# Altium footprint library PcbLib1.PcbLib: 24 footprints (part 2 of 2)
Each footprint in its own frame and in the unit in brackets; x right, y up, seen from the top. Pads: shape width x height; smd on the part's side, far side on the other; paste and mask are expansions set on the pad; w line width, h text height; cw(c..) or ccw(c..) is an arc to the next point about the centre after c.
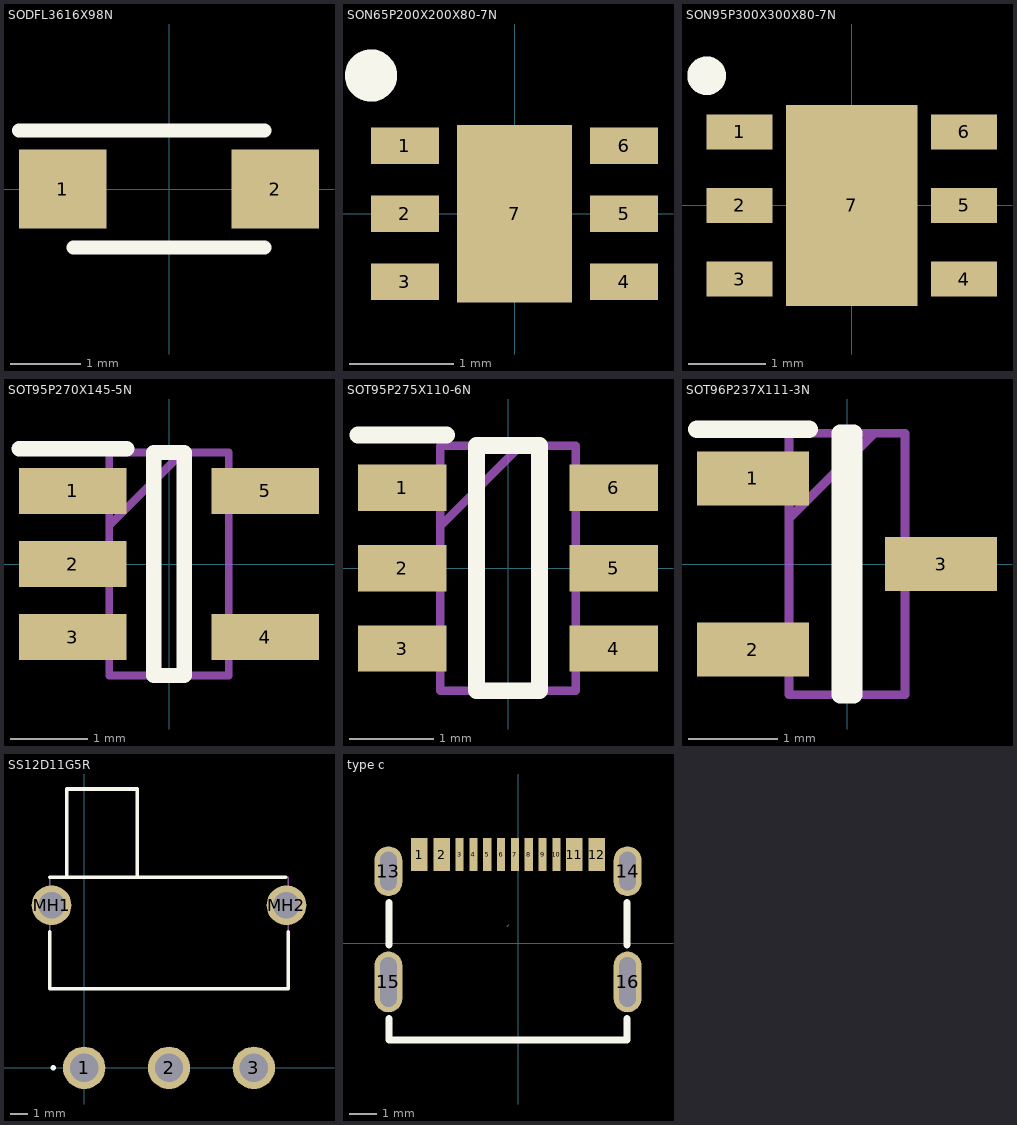
[diagram p1: the footprints below, top view; thin cyan lines are the x and y axes]

## SODFL3616X98N [mm]
pads (2):
  rect 1.24x1.12 smd: 1(-1.5,0) 2(1.5,0)
Top Overlay:
  lines w0.2: -2.12,0.825 1.35,0.825 ; -1.35,-0.825 1.35,-0.825
3D body "NRVB120VLSFT1G.stp": height 0.98, standoff 0, extent -1.8,-0.825 1.8,0.825

## SON65P200X200X80-7N [mm]
pads (7):
  rect 0.65x0.35 smd: 1(-1.05,0.65) 2(-1.05,0) 3(-1.05,-0.65) 4(1.05,-0.65) 5(1.05,0) 6(1.05,0.65)
  rect 1.1x1.7 smd: 7(0,0)
Top Overlay:
  circle w0.25: c-1.375,1.325 r0.125
3D body "NCV8187AMT330TAG.stp": height 0.8, standoff 0, extent -1.05,-1 1.05,1

## SON95P300X300X80-7N [mm]
pads (7):
  rect 0.85x0.45 smd: 1(-1.45,0.95) 2(-1.45,0) 3(-1.45,-0.95) 4(1.45,-0.95) 5(1.45,0) 6(1.45,0.95)
  rect 1.7x2.6 smd: 7(0,0)
Top Overlay:
  circle w0.25: c-1.875,1.675 r0.125
3D body "NCV8187AMLE330TCG.stp": height 0.8, standoff 0, extent -1.55,-1.5 1.55,1.5

## SOT95P270X145-5N [mm]
pads (5):
  rect 1.4x0.6 smd: 1(-1.25,0.95) 2(-1.25,0) 3(-1.25,-0.95) 4(1.25,-0.95) 5(1.25,0.95)
Top Overlay:
  lines w0.2: -1.95,1.5 -0.55,1.5 ; -0.2,-1.45 0.2,-1.45 0.2,1.45 -0.2,1.45 -0.2,-1.45
Mechanical 13:
  lines w0.1: -0.775,0.5 0.175,1.45 ; -0.775,-1.45 0.775,-1.45 0.775,1.45 -0.775,1.45 -0.775,-1.45
3D body "MCP73831T-2ACI_OT.stp": height 1.45, standoff 0, extent -1.35,-1.45 1.35,1.45

## SOT95P275X110-6N [mm]
pads (6):
  rect 1.05x0.55 smd: 1(-1.25,0.95) 2(-1.25,0) 3(-1.25,-0.95) 4(1.25,-0.95) 5(1.25,0) 6(1.25,0.95)
Top Overlay:
  lines w0.2: -1.775,1.575 -0.725,1.575 ; -0.375,-1.45 -0.375,1.45 0.375,1.45 0.375,-1.45 -0.375,-1.45
Mechanical 13:
  lines w0.1: -0.8,0.5 0.15,1.45 ; -0.8,-1.45 -0.8,1.45 0.8,1.45 0.8,-1.45 -0.8,-1.45
3D body "MAX16054AZT+T.stp": height 1.1, standoff 0, extent -1.375,-1.45 1.375,1.45

## SOT96P237X111-3N [mm]
pads (3):
  rect 1.25x0.6 smd: 1(-1.05,0.955) 2(-1.05,-0.955) 3(1.05,0)
Top Overlay:
  lines w0.2: -1.675,1.505 -0.425,1.505 ; -0.075,-1.46 0.075,-1.46 0.075,1.46 -0.075,1.46 -0.075,-1.46
Mechanical 13:
  lines w0.1: -0.65,0.505 0.305,1.46 ; -0.65,-1.46 0.65,-1.46 0.65,1.46 -0.65,1.46 -0.65,-1.46
3D body "MMBT2222ALT1G.stp": height 1.11, standoff 0, extent -1.185,-1.46 1.185,1.46

## SS12D11G5R [mm]
pads (5):
  round 2.4 hole 1.6: 1(0,0) 2(4.8,0) 3(9.6,0)
  round 2.25 hole 1.5: MH1(-1.85,9.2) MH2(11.45,9.2)
Top Overlay:
  lines w0.2: -1.95,7.7 -1.95,4.48 11.55,4.48 11.55,7.7 ; -1.95,10.78 11.4,10.78 ; -1.8,0 ccw(c-1.75,0) -1.7,0 ; -1.8,0 cw(c-1.75,0) -1.7,0 ; -1.8,0 ccw(c-1.75,0) -1.7,0 ; -1,10.78 3,10.78 3,15.78 -1,15.78 -1,10.78
Mechanical 13:
  lines w0.1: -1.95,4.48 11.55,4.48 11.55,10.78 -1.95,10.78 -1.95,4.48

## type c [mm]
pads (16):
  rect 0.6x1.2 smd: 1(-3.579,3.203) 2(-2.779,3.203) 11(2.021,3.203) 12(2.821,3.203)
  rect 0.3x1.2 smd: 3(-2.129,3.203) 4(-1.629,3.203) 5(-1.129,3.203) 6(-0.629,3.203) 7(-0.129,3.203) 8(0.371,3.203) 9(0.871,3.203) 10(1.371,3.203)
  oval 1x1.8 hole 0.6 slot 1.4 at 90 deg: 13(-4.699,2.603) 14(3.941,2.603)
  oval 1x2.2 hole 0.6 slot 1.8 at 90 deg: 15(-4.699,-1.397) 16(3.941,-1.397)
Top Overlay:
  lines w0.254: -4.679,-2.728 -4.679,-3.497 3.921,-3.497 3.921,-2.728 ; -4.679,-0.066 -4.679,1.472 ; 3.921,-0.066 3.921,1.472
Mechanical 15:
  lines w0.003: -0.404,0.621 -0.354,0.672